# Altium footprint library PiggySat.PcbLib: 10 footprints
Each footprint in its own frame and in the unit in brackets; x right, y up, seen from the top. Pads: shape width x height; smd on the part's side, far side on the other; paste and mask are expansions set on the pad; w line width, h text height; cw(c..) or ccw(c..) is an arc to the next point about the centre after c.
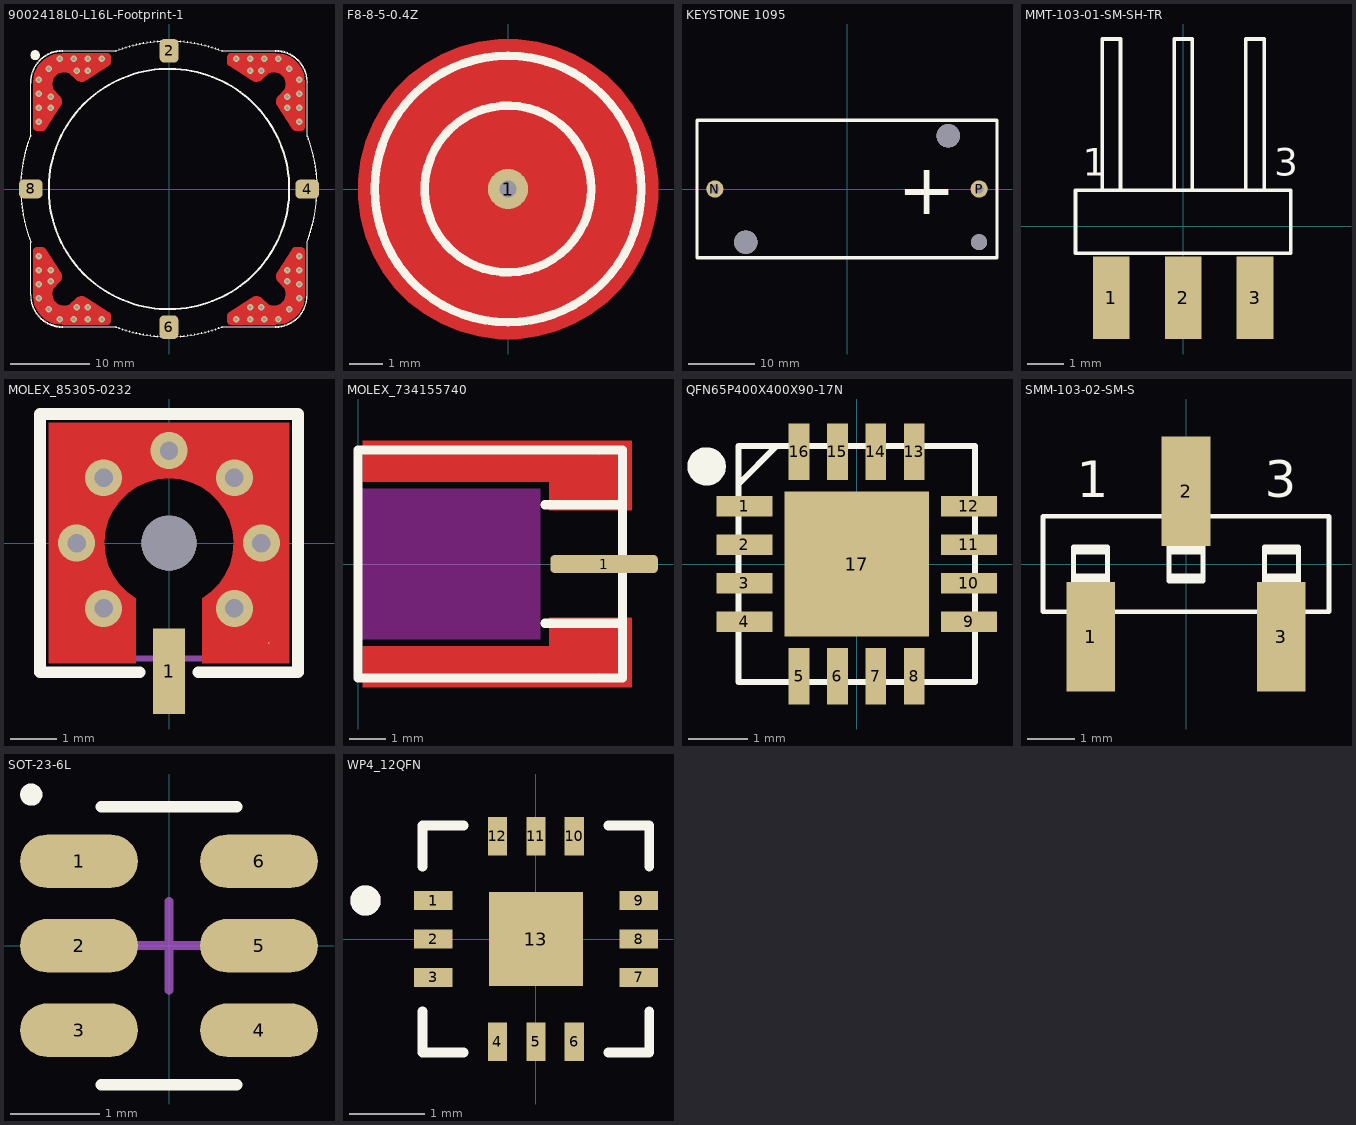
[diagram p0: the footprints below, top view; thin cyan lines are the x and y axes]

## 9002418L0-L16L-Footprint-1 [mm]
pads (8):
  round 0.025 smd: 1(-15.24,15.24) 3(15.24,15.24) 5(15.24,-15.24) 7(-15.24,-15.24)
  rrect50% 2.4x3 smd: 2(0.015,17.511) 6(-0.015,-17.511)
  rrect50% 3x2.4 smd: 4(17.511,-0.015) 8(-17.511,0.015)
via -15.24,-15.24 diameter 0.8 hole 0.4
via -16.51,-8.509 diameter 0.8 hole 0.4
via -16.51,-12.065 diameter 0.8 hole 0.4
via -16.51,-10.287 diameter 0.8 hole 0.4
via -14.986,-10.287 diameter 0.8 hole 0.4
via -14.986,-11.684 diameter 0.8 hole 0.4
via -16.51,-13.843 diameter 0.8 hole 0.4
via -13.843,-16.51 diameter 0.8 hole 0.4
via -12.065,-16.51 diameter 0.8 hole 0.4
via -10.287,-16.51 diameter 0.8 hole 0.4
via -8.509,-16.51 diameter 0.8 hole 0.4
via -10.287,-14.986 diameter 0.8 hole 0.4
via -11.684,-14.986 diameter 0.8 hole 0.4
via 15.24,-15.24 diameter 0.8 hole 0.4
via 8.509,-16.51 diameter 0.8 hole 0.4
via 12.065,-16.51 diameter 0.8 hole 0.4
via 10.287,-16.51 diameter 0.8 hole 0.4
via 10.287,-14.986 diameter 0.8 hole 0.4
via 11.684,-14.986 diameter 0.8 hole 0.4
via 13.843,-16.51 diameter 0.8 hole 0.4
via 16.51,-13.843 diameter 0.8 hole 0.4
via 16.51,-12.065 diameter 0.8 hole 0.4
via 16.51,-10.287 diameter 0.8 hole 0.4
via 16.51,-8.509 diameter 0.8 hole 0.4
via 14.986,-10.287 diameter 0.8 hole 0.4
via 14.986,-11.684 diameter 0.8 hole 0.4
via 15.24,15.24 diameter 0.8 hole 0.4
via 16.51,8.509 diameter 0.8 hole 0.4
via 16.51,12.065 diameter 0.8 hole 0.4
via 16.51,10.287 diameter 0.8 hole 0.4
via 14.986,10.287 diameter 0.8 hole 0.4
via 14.986,11.684 diameter 0.8 hole 0.4
via 16.51,13.843 diameter 0.8 hole 0.4
via 13.843,16.51 diameter 0.8 hole 0.4
via 12.065,16.51 diameter 0.8 hole 0.4
via 10.287,16.51 diameter 0.8 hole 0.4
via 8.509,16.51 diameter 0.8 hole 0.4
via 10.287,14.986 diameter 0.8 hole 0.4
via 11.684,14.986 diameter 0.8 hole 0.4
via -15.24,15.24 diameter 0.8 hole 0.4
via -8.509,16.51 diameter 0.8 hole 0.4
via -12.065,16.51 diameter 0.8 hole 0.4
via -10.287,16.51 diameter 0.8 hole 0.4
via -10.287,14.986 diameter 0.8 hole 0.4
via -11.684,14.986 diameter 0.8 hole 0.4
via -13.843,16.51 diameter 0.8 hole 0.4
via -16.51,13.843 diameter 0.8 hole 0.4
via -16.51,12.065 diameter 0.8 hole 0.4
via -16.51,10.287 diameter 0.8 hole 0.4
via -16.51,8.509 diameter 0.8 hole 0.4
via -14.986,10.287 diameter 0.8 hole 0.4
via -14.986,11.684 diameter 0.8 hole 0.4
Top Layer:
  region: -17.193,7.719 -17.163,7.635 -17.114,7.559 -17.051,7.495 -16.975,7.447 -16.891,7.419 -16.802,7.409 -15.903,7.409 -15.824,7.429 -15.75,7.468 -15.69,7.521 -15.639,7.584 -15.603,7.658 -13.752,10.508 -13.665,10.678 -13.609,10.864 -13.589,11.054 -13.604,11.245 -13.655,11.43 -13.739,11.603 -13.853,11.758 -14.653,12.659 -14.742,12.906 -14.788,13.162 -14.788,13.426 -14.742,13.683 -14.653,13.929 -14.521,14.158 -14.353,14.359 -14.153,14.526 -13.924,14.658 -13.678,14.747 -13.419,14.793 -13.157,14.793 -12.898,14.747 -12.652,14.658 -11.753,13.858 -11.598,13.744 -11.425,13.658 -11.239,13.607 -11.049,13.591 -10.856,13.614 -10.673,13.67 -10.503,13.759 -7.653,15.608 -7.564,15.659 -7.493,15.728 -7.437,15.814 -7.402,15.908 -7.402,16.807 -7.412,16.896 -7.442,16.982 -7.491,17.059 -7.554,17.122 -7.628,17.168 -7.714,17.198 -7.803,17.209 -13.553,17.209 -14.072,17.17 -14.58,17.061 -15.07,16.878 -15.525,16.629 -15.944,16.317 -16.312,15.949 -16.622,15.532 -16.873,15.075 -17.054,14.587 -17.165,14.077 -17.203,13.558 -17.203,7.808
  region: 7.719,17.193 7.635,17.163 7.559,17.114 7.495,17.051 7.447,16.975 7.419,16.891 7.409,16.802 7.409,15.903 7.429,15.824 7.468,15.75 7.521,15.69 7.584,15.639 7.658,15.603 10.508,13.752 10.678,13.665 10.864,13.609 11.054,13.589 11.245,13.604 11.43,13.655 11.603,13.739 11.758,13.853 12.659,14.653 12.906,14.742 13.162,14.788 13.426,14.788 13.683,14.742 13.929,14.653 14.158,14.521 14.359,14.353 14.526,14.153 14.658,13.924 14.747,13.678 14.793,13.419 14.793,13.157 14.747,12.898 14.658,12.652 13.858,11.753 13.744,11.598 13.658,11.425 13.607,11.239 13.591,11.049 13.614,10.856 13.67,10.673 13.759,10.503 15.608,7.653 15.659,7.564 15.728,7.493 15.814,7.437 15.908,7.402 16.807,7.402 16.896,7.412 16.982,7.442 17.059,7.491 17.122,7.554 17.168,7.628 17.198,7.714 17.209,7.803 17.209,13.553 17.17,14.072 17.061,14.58 16.878,15.07 16.629,15.525 16.317,15.944 15.949,16.312 15.532,16.622 15.075,16.873 14.587,17.054 14.077,17.165 13.558,17.203 7.808,17.203
  region: 17.193,-7.719 17.163,-7.635 17.114,-7.559 17.051,-7.495 16.975,-7.447 16.891,-7.419 16.802,-7.409 15.903,-7.409 15.824,-7.429 15.75,-7.468 15.69,-7.521 15.639,-7.584 15.603,-7.658 13.752,-10.508 13.665,-10.678 13.609,-10.864 13.589,-11.054 13.604,-11.245 13.655,-11.43 13.739,-11.603 13.853,-11.758 14.653,-12.659 14.742,-12.906 14.788,-13.162 14.788,-13.426 14.742,-13.683 14.653,-13.929 14.521,-14.158 14.353,-14.359 14.153,-14.526 13.924,-14.658 13.678,-14.747 13.419,-14.793 13.157,-14.793 12.898,-14.747 12.652,-14.658 11.753,-13.858 11.598,-13.744 11.425,-13.658 11.239,-13.607 11.049,-13.591 10.856,-13.614 10.673,-13.67 10.503,-13.759 7.653,-15.608 7.564,-15.659 7.493,-15.728 7.437,-15.814 7.402,-15.908 7.402,-16.807 7.412,-16.896 7.442,-16.982 7.491,-17.059 7.554,-17.122 7.628,-17.168 7.714,-17.198 7.803,-17.209 13.553,-17.209 14.072,-17.17 14.58,-17.061 15.07,-16.878 15.525,-16.629 15.944,-16.317 16.312,-15.949 16.622,-15.532 16.873,-15.075 17.054,-14.587 17.165,-14.077 17.203,-13.558 17.203,-7.808
  region: -7.719,-17.193 -7.635,-17.163 -7.559,-17.114 -7.495,-17.051 -7.447,-16.975 -7.419,-16.891 -7.409,-16.802 -7.409,-15.903 -7.429,-15.824 -7.468,-15.75 -7.521,-15.69 -7.584,-15.639 -7.658,-15.603 -10.508,-13.752 -10.678,-13.665 -10.864,-13.609 -11.054,-13.589 -11.245,-13.604 -11.43,-13.655 -11.603,-13.739 -11.758,-13.853 -12.659,-14.653 -12.906,-14.742 -13.162,-14.788 -13.426,-14.788 -13.683,-14.742 -13.929,-14.653 -14.158,-14.521 -14.359,-14.353 -14.526,-14.153 -14.658,-13.924 -14.747,-13.678 -14.793,-13.419 -14.793,-13.157 -14.747,-12.898 -14.658,-12.652 -13.858,-11.753 -13.744,-11.598 -13.658,-11.425 -13.607,-11.239 -13.591,-11.049 -13.614,-10.856 -13.67,-10.673 -13.759,-10.503 -15.608,-7.653 -15.659,-7.564 -15.728,-7.493 -15.814,-7.437 -15.908,-7.402 -16.807,-7.402 -16.896,-7.412 -16.982,-7.442 -17.059,-7.491 -17.122,-7.554 -17.168,-7.628 -17.198,-7.714 -17.209,-7.803 -17.209,-13.553 -17.17,-14.072 -17.061,-14.58 -16.878,-15.07 -16.629,-15.525 -16.317,-15.944 -15.949,-16.312 -15.532,-16.622 -15.075,-16.873 -14.587,-17.054 -14.077,-17.165 -13.558,-17.203 -7.808,-17.203
Top Overlay:
  drawing of 1734 lines, arcs and shapes, not listed
3D body "9002418L0-L16L-ME_FIT.stp": height 18.09, standoff 0.12, extent -18.762,-18.762 18.762,18.762

## F8-8-5-0.4Z [mm] "Capacitive Touch Contact Spring, Conical Ø8/Ø5 mm, 8 mm Height, Ø0.4 mm Wire, 3 mm THT Lead, Nickel-Plated Carbon Steel"
pads (1):
  round 1.2 hole 0.5: 1(0,0)
Top Layer:
  pour cut-out: 0,-4.5 -0.295,-4.5 -0.88,-4.423 -1.45,-4.27 -1.995,-4.045 -2.505,-3.75 -2.973,-3.391 -3.391,-2.973 -3.75,-2.505 -4.045,-1.995 -4.27,-1.45 -4.423,-0.88 -4.5,-0.295 -4.5,0 -4.5,0.295 -4.423,0.88 -4.27,1.45 -4.045,1.995 -3.75,2.505 -3.391,2.973 -2.973,3.391 -2.505,3.75 -1.995,4.045 -1.45,4.27 -0.88,4.423 -0.295,4.5 0,4.5 0.295,4.5 0.88,4.423 1.45,4.27 1.995,4.045 2.505,3.75 2.973,3.391 3.391,2.973 3.75,2.505 4.045,1.995 4.27,1.45 4.423,0.88 4.5,0.295 4.5,0 4.5,-0.295 4.423,-0.88 4.27,-1.45 4.045,-1.995 3.75,-2.505 3.391,-2.973 2.973,-3.391 2.505,-3.75 1.995,-4.045 1.45,-4.27 0.88,-4.423 0.295,-4.5
Top Overlay:
  circle w0.254: c0,0 r2.5
  circle w0.254: c0,0 r4
3D body "F8-8-5-0.4Z.step": height 8.4, standoff -3, extent -4,-4 4.4,4.398

## KEYSTONE 1095 [mm] "THM Holder for 18350 Battery P/N 1095"
pads (5):
  round 2.6 hole 1.32: N(-19.89,0) P(19.89,0)
  round 3.55 hole 3.55 unplated: ""(-15.24,-8) ""(15.24,8)
  round 2.39 hole 2.39 unplated: ""(19.88,-8)
Top Overlay:
  lines w0.508: -22.575,-10.325 -22.575,10.325 22.575,10.325 22.575,-10.325 -22.575,-10.325
  text "+" at 7.62,-3.81 h7.62
3D body "18350.step": height 17.48, standoff -0.48, extent -17.78,-9 17.82,9
3D body "keystone-PN1095.STEP": height 14.86, standoff -3.55, extent -22.576,-10.325 22.576,10.325

## MMT-103-01-SM-SH-TR [mm] "MMT Series 2.00 mm Horizontal Surface Mount Terminal Strip"
pads (3):
  rect 1.02x2.29 smd: 1(-2,-2) 2(0,-2) 3(2,-2)
Top Overlay:
  lines w0.1: -2.254,0.999 -2.254,5.207 -1.746,5.207 -1.746,0.999 ; -1.001,0.999 -2.999,0.999 -2.999,-0.762 2.999,-0.762 2.999,0.999 1.001,0.999 ; -0.999,0.999 0.999,0.999 ; -0.254,0.999 -0.254,5.207 0.254,5.207 0.254,0.999 ; 1.746,0.999 1.746,5.207 2.254,5.207 2.254,0.999
  text "3" at 2.54,1.397 h0.76
  text "1" at -2.794,1.397 h0.76
3D body "MMT-103-01-SM-SH-TR.stp": height 1.95, standoff -0.05, extent -3,-2.794 3,5.2

## MOLEX_85305-0232 [mm]
height 4.1
pads (3):
  rect 0.7x1.85 smd: 1(0,-2.775)
  round 0.025 smd: 2(2.159,-2.159)
  round 1.19 hole 1.19 unplated: ""(0,0)
via 0,2 diameter 0.8 hole 0.4
via -2,0 diameter 0.8 hole 0.4
via 2,0 diameter 0.8 hole 0.4
via 1.414,1.414 diameter 0.8 hole 0.4
via -1.414,-1.414 diameter 0.8 hole 0.4
via 1.414,-1.414 diameter 0.8 hole 0.4
via -1.414,1.414 diameter 0.8 hole 0.4
Top Layer:
  region: 2.6,-2.6 0.725,-2.6 0.725,-1.198 0.917,-1.058 1.086,-0.884 1.222,-0.683 1.322,-0.462 1.381,-0.227 1.4,0.015 1.376,0.256 1.312,0.49 1.208,0.708 1.067,0.906 0.895,1.077 0.696,1.215 0.476,1.317 0.242,1.379 0,1.4 -0.242,1.379 -0.476,1.317 -0.696,1.215 -0.895,1.077 -1.067,0.906 -1.208,0.708 -1.312,0.49 -1.376,0.256 -1.4,0.015 -1.381,-0.227 -1.322,-0.462 -1.222,-0.683 -1.086,-0.884 -0.917,-1.058 -0.725,-1.198 -0.725,-2.6 -2.6,-2.6 -2.6,2.6 2.6,2.6
Top Overlay:
  lines w0.254: -0.635,-2.794 -2.794,-2.794 -2.794,2.794 2.794,2.794 2.794,-2.487 2.794,-2.794 0.635,-2.794
Top Paste:
  region: 2.6,-2.6 0.725,-2.6 0.725,-1.198 0.917,-1.058 1.086,-0.884 1.222,-0.683 1.322,-0.462 1.381,-0.227 1.4,0.015 1.376,0.256 1.312,0.49 1.208,0.708 1.067,0.906 0.895,1.077 0.696,1.215 0.476,1.317 0.242,1.379 0,1.4 -0.242,1.379 -0.476,1.317 -0.696,1.215 -0.895,1.077 -1.067,0.906 -1.208,0.708 -1.312,0.49 -1.376,0.256 -1.4,0.015 -1.381,-0.227 -1.322,-0.462 -1.222,-0.683 -1.086,-0.884 -0.917,-1.058 -0.725,-1.198 -0.725,-2.6 -2.6,-2.6 -2.6,2.6 2.6,2.6
Top Solder:
  region: 2.6,-2.6 0.725,-2.6 0.725,-1.198 0.917,-1.058 1.086,-0.884 1.222,-0.683 1.322,-0.462 1.381,-0.227 1.4,0.015 1.376,0.256 1.312,0.49 1.208,0.708 1.067,0.906 0.895,1.077 0.696,1.215 0.476,1.317 0.242,1.379 0,1.4 -0.242,1.379 -0.476,1.317 -0.696,1.215 -0.895,1.077 -1.067,0.906 -1.208,0.708 -1.312,0.49 -1.376,0.256 -1.4,0.015 -1.381,-0.227 -1.322,-0.462 -1.222,-0.683 -1.086,-0.884 -0.917,-1.058 -0.725,-1.198 -0.725,-2.6 -2.6,-2.6 -2.6,2.6 2.6,2.6
Top 3D Body:
  lines w0.127: -2.5,-2.5 2.5,-2.5 2.5,2.5 -2.5,2.5 -2.5,-2.5
3D body "853050232.stp": height 4.09, standoff -0.01, extent -2.5,-3.475 2.5,2.5

## MOLEX_734155740 [mil] "SMP PLUG, PCB EDGE MNT, SMOOTH B"
pads (3):
  rrect50% 118.11x19.68 smd: 1(270,0)
  round 1 smd: 2(265,-120) 2(265,120)
Top Layer:
  region: 5,-90 5,-135 300,-135 300,-59.33 300,-59.29 299.98,-59.22 299.95,-59.14 299.91,-59.08 299.88,-59.05 210,-59.06 210,-90
  region: 5,90 5,135 300,135 300,59.33 300,59.29 299.98,59.22 299.95,59.14 299.91,59.08 299.88,59.05 210,59.06 210,90
Top Overlay:
  lines w10: 205,-65 290,-65 ; 205,65 290,65 ; 0,-125 0,125 290,125 290,-125 0,-125
Keep-Out Layer:
  board cut-out: 0,82.68 200,82.68 200,-82.68 0,-82.68
3D body "734155740.stp": height 96.87, standoff -74.13, extent 0,-124.98 290.47,125

## QFN65P400X400X90-17N [mm]
pads (17):
  rect 0.95x0.35 smd: 1(-1.9,0.975) 2(-1.9,0.325) 3(-1.9,-0.325) 4(-1.9,-0.975) 9(1.9,-0.975) 10(1.9,-0.325) 11(1.9,0.325) 12(1.9,0.975)
  rect 0.35x0.95 smd: 5(-0.975,-1.9) 6(-0.325,-1.9) 7(0.325,-1.9) 8(0.975,-1.9) 13(0.975,1.9) 14(0.325,1.9) 15(-0.325,1.9) 16(-0.975,1.9)
  rect 2.45x2.45 smd: 17(0,0)
Top Overlay:
  circle w0.325: c-2.54,1.651 r0.162
  lines w0.1: -2,1.35 -1.35,2 ; -2,-2 -2,2 2,2 2,-2 -2,-2
3D body "RFSW6024TR13.stp": height 0.9, standoff 0, extent -2.05,-2.05 2.05,2.05

## SMM-103-02-SM-S [mil] "SMM Series 2.00 mm Tiger Eye™ High-Reliability Socket Strip"
pads (3):
  rect 40.16x90.16 smd: 1(-78.74,-60) 2(0,60) 3(78.74,-60)
Top Overlay:
  lines w3.94: -92.76,-10 -64.72,-10 ; -92.76,10 -64.72,10 ; -39.41,-39.33 -118.07,-39.33 -118.07,39.33 -39.41,39.33 ; -39.33,-39.33 39.33,-39.33 ; -39.33,39.33 39.33,39.33 ; -14.02,-10 14.02,-10 ; -14.02,10 14.02,10 ; 39.41,-39.33 118.07,-39.33 118.07,39.33 39.41,39.33 ; 64.72,-10 92.76,-10 ; 64.72,10 92.76,10 ; -92.76,-14.02 -92.76,14.02 -64.72,14.02 -64.72,-14.02 -92.76,-14.02 ; -14.02,-14.02 14.02,-14.02 14.02,14.02 -14.02,14.02 -14.02,-14.02 ; 64.72,-14.02 92.76,-14.02 92.76,14.02 64.72,14.02 64.72,-14.02
  text "3" at 65,55 h30
  text "1" at -90,55 h30
3D body "SMM-103-02-SM-S.stp": height 145.91, standoff 0.91, extent -118.05,-85 118.05,85

## SOT-23-6L [mm] "SOT23, 6-Leads"
height 1.1
pads (6):
  oval 1.325x0.6 smd: 1(-1.012,0.95) 2(-1.012,0) 3(-1.012,-0.95) 4(1.012,-0.95) 5(1.012,0) 6(1.012,0.95)
Top Overlay:
  circle w0.125: c-1.55,1.7 r0.062
  lines w0.127: -0.764,-1.563 0.764,-1.563 ; -0.764,1.563 0.764,1.563
Top Component Center (Mech19):
  lines w0.1: -0.5,0 0.5,0 ; 0,-0.5 0,0.5
3D body "TTP223-BA6--3DModel-STEP-269445.STEP": height 1.26, standoff 0, extent -1.425,-1.45 1.425,1.45

## WP4_12QFN [mil]
height 35.04
pads (13):
  rect 20x10 smd: 1(-53.5,20) 2(-53.5,0) 3(-53.5,-20) 7(53.5,-20) 8(53.5,0) 9(53.5,20)
  rect 10x20 smd: 4(-20,-53.5) 5(0,-53.5) 6(20,-53.5) 10(20,53.5) 11(0,53.5) 12(-20,53.5)
  rect 49x49 smd paste-9: 13(0,0)
Top Overlay:
  circle w7.87: c-88.58,20 r3.94
  lines w5: -59,-37.6 -59,-59 -37.6,-59 ; -59,37.6 -59,59 -37.6,59 ; 37.6,-59 59,-59 59,-37.6 ; 37.6,59 59,59 59,37.6
Top 3D Body:
  circle w7.87: c-88.58,20 r3.94
3D body "step_temp.STEP": height 35.04, standoff 0, extent -59.06,-59.06 59.06,59.06